# Altium footprint library LM5122MHNOPB.PcbLib: 3 footprints
Each footprint in its own frame and in the unit in brackets; x right, y up, seen from the top. Pads: shape width x height; smd on the part's side, far side on the other; paste and mask are expansions set on the pad; w line width, h text height; cw(c..) or ccw(c..) is an arc to the next point about the centre after c.
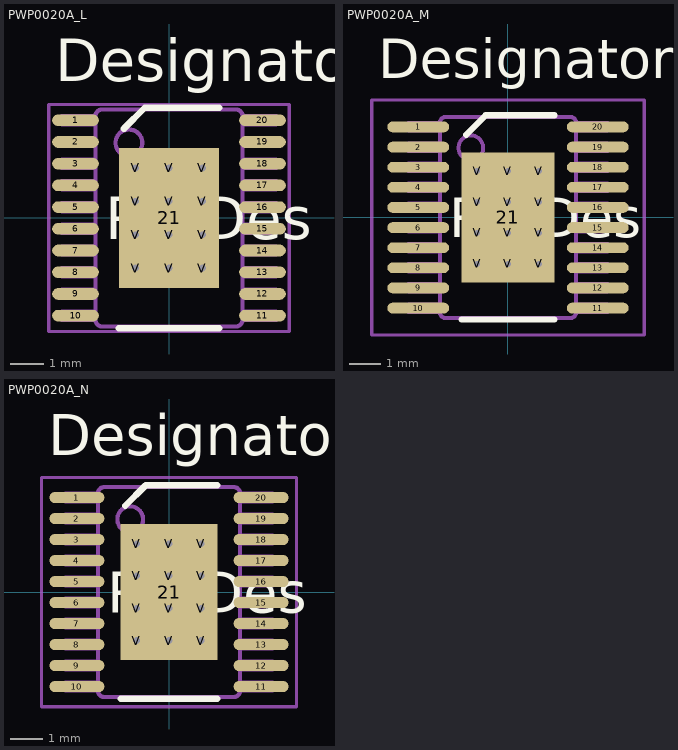
[diagram p0: the footprints below, top view; thin cyan lines are the x and y axes]

## PWP0020A_L [mm]
pads (33):
  oval 1.4x0.35 smd paste-0.102 mask+0.051: 1(-2.8,2.925) 2(-2.8,2.275) 3(-2.8,1.625) 4(-2.8,0.975) 5(-2.8,0.325) 6(-2.8,-0.325) 7(-2.8,-0.975) 8(-2.8,-1.625) 9(-2.8,-2.275) 10(-2.8,-2.925) 11(2.8,-2.925) 12(2.8,-2.275) 13(2.8,-1.625) 14(2.8,-0.975) 15(2.8,-0.325) 16(2.8,0.325) 17(2.8,0.975) 18(2.8,1.625) 19(2.8,2.275) 20(2.8,2.925)
  rect 3x4.2 smd paste-0.102 mask+0.051: 21(0,0)
  round 0.5 / inner round 1.524 / far side round 0.5 hole 0.203 paste-0.25 mask+0.051: V(-1,-1.5) V(-1,-0.5) V(-1,0.5) V(-1,1.5) V(0,-1.5) V(0,-0.5) V(0,0.5) V(0,1.5) V(1,-1.5) V(1,-0.5) V(1,0.5) V(1,1.5)
Top Overlay:
  lines w0.2: -1.5,-3.3 1.5,-3.3 ; -1.35,2.675 -0.725,3.3 1.5,3.3
  text "Designator48" at -3.404,4.089 h1.27
  text "RefDes" at -1.905,-0.635 h1.27
Mechanical 13:
  drawing of 250 lines, arcs and shapes, not listed
Mechanical 15:
  lines w0.1: -0.5,0 0.5,0 ; 0,-0.5 0,0.5 ; -3.6,-3.4 -3.6,3.4 3.6,3.4 3.6,-3.4 -3.6,-3.4

## PWP0020A_M [mm]
pads (33):
  oval 2x0.35 smd paste-0.102 mask+0.051: 1(-2.9,2.925) 2(-2.9,2.275) 3(-2.9,1.625) 4(-2.9,0.975) 5(-2.9,0.325) 6(-2.9,-0.325) 7(-2.9,-0.975) 8(-2.9,-1.625) 9(-2.9,-2.275) 10(-2.9,-2.925) 11(2.9,-2.925) 12(2.9,-2.275) 13(2.9,-1.625) 14(2.9,-0.975) 15(2.9,-0.325) 16(2.9,0.325) 17(2.9,0.975) 18(2.9,1.625) 19(2.9,2.275) 20(2.9,2.925)
  rect 3x4.2 smd paste-0.102 mask+0.051: 21(0,0)
  round 0.5 / inner round 1.524 / far side round 0.5 hole 0.203 paste-0.25 mask+0.051: V(-1,-1.5) V(-1,-0.5) V(-1,0.5) V(-1,1.5) V(0,-1.5) V(0,-0.5) V(0,0.5) V(0,1.5) V(1,-1.5) V(1,-0.5) V(1,0.5) V(1,1.5)
Top Overlay:
  lines w0.2: -1.5,-3.3 1.5,-3.3 ; -1.35,2.675 -0.725,3.3 1.5,3.3
  text "Designator47" at -4.191,4.496 h1.27
  text "RefDes" at -1.905,-0.635 h1.27
Mechanical 13:
  drawing of 250 lines, arcs and shapes, not listed
Mechanical 15:
  lines w0.1: -0.5,0 0.5,0 ; 0,-0.5 0,0.5 ; -4.4,-3.8 -4.4,3.8 4.4,3.8 4.4,-3.8 -4.4,-3.8

## PWP0020A_N [mm]
pads (33):
  oval 1.7x0.35 smd paste-0.102 mask+0.051: 1(-2.85,2.925) 2(-2.85,2.275) 3(-2.85,1.625) 4(-2.85,0.975) 5(-2.85,0.325) 6(-2.85,-0.325) 7(-2.85,-0.975) 8(-2.85,-1.625) 9(-2.85,-2.275) 10(-2.85,-2.925) 11(2.85,-2.925) 12(2.85,-2.275) 13(2.85,-1.625) 14(2.85,-0.975) 15(2.85,-0.325) 16(2.85,0.325) 17(2.85,0.975) 18(2.85,1.625) 19(2.85,2.275) 20(2.85,2.925)
  rect 3x4.2 smd paste-0.102 mask+0.051: 21(0,0)
  round 0.5 / inner round 1.524 / far side round 0.5 hole 0.203 paste-0.25 mask+0.051: V(-1,-1.5) V(-1,-0.5) V(-1,0.5) V(-1,1.5) V(0,-1.5) V(0,-0.5) V(0,0.5) V(0,1.5) V(1,-1.5) V(1,-0.5) V(1,0.5) V(1,1.5)
Top Overlay:
  lines w0.2: -1.5,-3.3 1.5,-3.3 ; -1.35,2.675 -0.725,3.3 1.5,3.3
  text "Designator46" at -3.734,4.242 h1.27
  text "RefDes" at -1.905,-0.635 h1.27
Mechanical 13:
  drawing of 250 lines, arcs and shapes, not listed
Mechanical 15:
  lines w0.1: -0.5,0 0.5,0 ; 0,-0.5 0,0.5 ; -3.95,-3.55 -3.95,3.55 3.95,3.55 3.95,-3.55 -3.95,-3.55